# Altium footprint library PCB_V2.PcbLib: 82 footprints (part 1 of 6)
Each footprint in its own frame and in the unit in brackets; x right, y up, seen from the top. Pads: shape width x height; smd on the part's side, far side on the other; paste and mask are expansions set on the pad; w line width, h text height; cw(c..) or ccw(c..) is an arc to the next point about the centre after c.
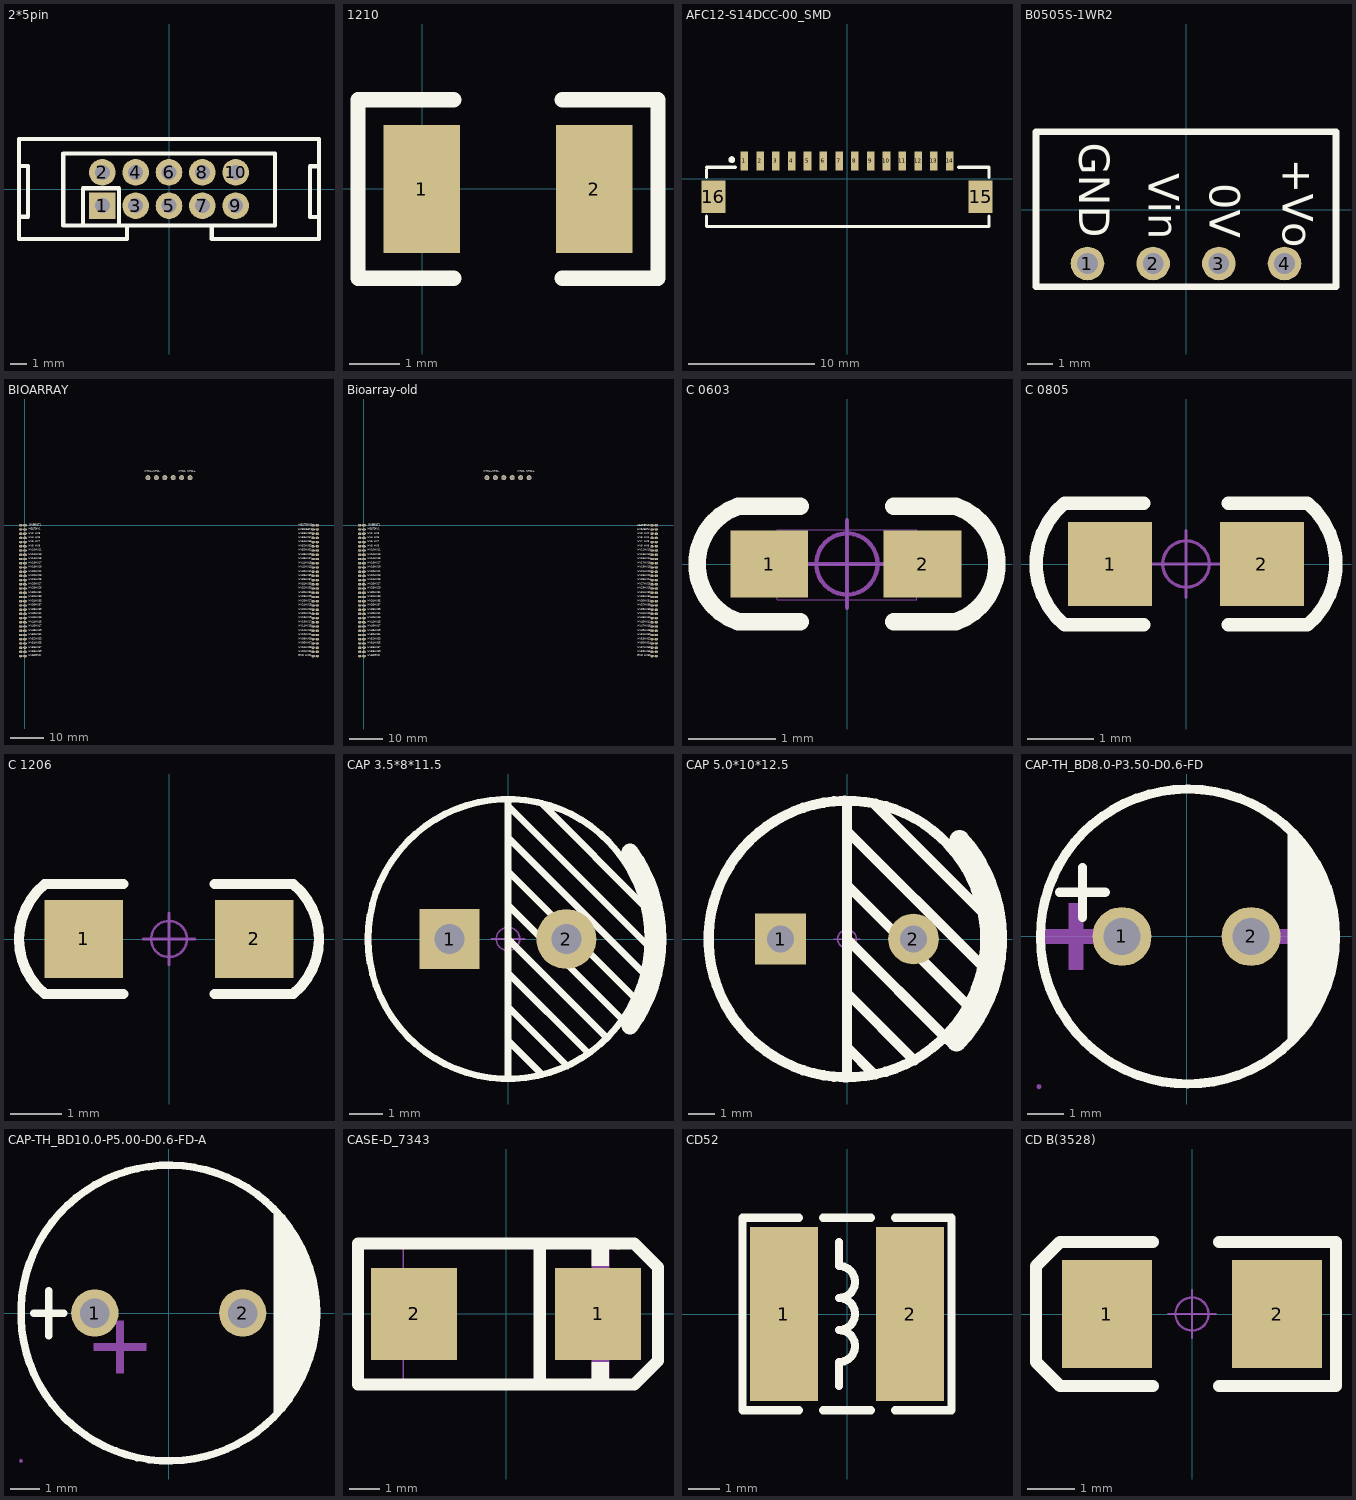
[diagram p0: the footprints below, top view; thin cyan lines are the x and y axes]

## 2*5pin [mm]
pads (10):
  rect 1.6x1.6 hole 0.9: 1(-4,-1)
  round 1.6 hole 0.9: 2(-4,1) 3(-2,-1) 4(-2,1) 5(0,-1) 6(0,1) 7(2,-1) 8(2,1) 9(4,-1) 10(4,1)
Top Overlay:
  lines w0.254: -8.994,-1.662 -8.456,-1.662 -8.456,1.386 -8.964,1.386 ; -5.156,-2.134 -5.156,0.051 -2.997,0.051 -2.997,-2.134 ; -2.512,-2.237 -2.512,-3 -9,-3 -9,3 9,3 9,-3 2.568,-3 2.568,-2.187 ; 8.966,-1.687 8.458,-1.687 8.458,1.361 8.996,1.361 ; -6.348,-2.184 6.352,-2.184 6.352,2.134 -6.348,2.134 -6.348,-2.184
Bottom Overlay:
  lines w0.254: -5.055,0 4.953,0 ; -2.977,-2.184 -2.977,2.184 ; -0.977,-2.184 -0.977,2.184 ; 1.023,-2.184 1.023,2.184 ; 3.023,-2.184 3.023,2.184

## 1210 [mil]
height 100
pads (2):
  rect 60x100 smd: 1(-0.2,-0.37) 2(134.8,-0.37)
Top Overlay:
  lines w12: 24.8,-70.37 -50.2,-70.37 -50.2,69.63 24.8,69.63 ; 109.8,-70.37 184.8,-70.37 184.8,69.63 109.8,69.63

## AFC12-S14DCC-00_SMD [mm]
pads (16):
  rect 0.6x1.5 smd: 1(-8.125,1.417) 2(-6.875,1.417) 3(-5.625,1.417) 4(-4.375,1.417) 5(-3.125,1.417) 6(-1.875,1.417) 7(-0.625,1.417) 8(0.625,1.417) 9(1.875,1.417) 10(3.125,1.417) 11(4.375,1.417) 12(5.625,1.417) 13(6.875,1.417) 14(8.125,1.417)
  rect 1.9x2.6 smd: 15(10.575,-1.418) 16(-10.575,-1.418)
Top Overlay:
  circle w0.254: c-9.125,1.518 r0.141
  lines w0.254: -11.125,-2.949 -11.125,-3.783 11.25,-3.783 11.25,-2.949 ; -11.125,0.114 -11.125,0.737 ; -11.125,0.917 -8.825,0.917 ; 8.826,0.917 11.25,0.917 11.25,0.114

## B0505S-1WR2 [mm]
pads (4):
  round 1.3 hole 0.8: 1(-3.81,-2.072) 2(-1.27,-2.072) 3(1.27,-2.072) 4(3.81,-2.072)
Top Overlay:
  lines w0.254: -5.8,-2.972 5.8,-2.972 5.8,3.028 -5.8,3.028 -5.8,-2.972
  text "+Vo" at 3.353,1.981 h2
  text "0V" at 0.533,1.041 h2
  text "Vin" at -1.829,1.422 h2
  text "GND" at -4.521,2.591 h2

## BIOARRAY [mm]
pads (134):
  oval 1.05x0.7 hole 0.6: 1(-1.27,0) 3(-1.27,-1.27) 5(-1.27,-2.54) 7(-1.27,-3.81) 9(-1.27,-5.08) 11(-1.27,-6.35) 13(-1.27,-7.62) 15(-1.27,-8.89) 17(-1.27,-10.16) 19(-1.27,-11.43) 21(-1.27,-12.7) 23(-1.27,-13.97) 25(-1.27,-15.24) 27(-1.27,-16.51) 29(-1.27,-17.78) 31(-1.27,-19.05) 33(-1.27,-20.32) 35(-1.27,-21.59) 37(-1.27,-22.86) 39(-1.27,-24.13) 41(-1.27,-25.4) 43(-1.27,-26.67) 45(-1.27,-27.94) 47(-1.27,-29.21) 49(-1.27,-30.48) 51(-1.27,-31.75) 53(-1.27,-33.02) 55(-1.27,-34.29) 57(-1.27,-35.56) 59(-1.27,-36.83) 61(-1.27,-38.1) 63(-1.27,-39.37) 65(87.93,0) 66(86.66,0) 67(87.93,-1.27) 68(86.66,-1.27) 69(87.93,-2.54) 70(86.66,-2.54) 71(87.93,-3.81) 72(86.66,-3.81) 73(87.93,-5.08) 74(86.66,-5.08) 75(87.93,-6.35) 76(86.66,-6.35) 77(87.93,-7.62) 78(86.66,-7.62) 79(87.93,-8.89) 80(86.66,-8.89) 81(87.93,-10.16) 82(86.66,-10.16) 83(87.93,-11.43) 84(86.66,-11.43) 85(87.93,-12.7) 86(86.66,-12.7) 87(87.93,-13.97) 88(86.66,-13.97) 89(87.93,-15.24) 90(86.66,-15.24) 91(87.93,-16.51) 92(86.66,-16.51) 93(87.93,-17.78) 94(86.66,-17.78) 95(87.93,-19.05) 96(86.66,-19.05) 97(87.93,-20.32) 98(86.66,-20.32) 99(87.93,-21.59) 100(86.66,-21.59) 101(87.93,-22.86) 102(86.66,-22.86) 103(87.93,-24.13) 104(86.66,-24.13) 105(87.93,-25.4) 106(86.66,-25.4) 107(87.93,-26.67) 108(86.66,-26.67) 109(87.93,-27.94) 110(86.66,-27.94) 111(87.93,-29.21) 112(86.66,-29.21) 113(87.93,-30.48) 114(86.66,-30.48) 115(87.93,-31.75) 116(86.66,-31.75) 117(87.93,-33.02) 118(86.66,-33.02) 119(87.93,-34.29) 120(86.66,-34.29) 121(87.93,-35.56) 122(86.66,-35.56) 123(87.93,-36.83) 124(86.66,-36.83) 125(87.93,-38.1) 126(86.66,-38.1) 127(87.93,-39.37) 128(86.66,-39.37)
  oval 1.1x0.7 hole 0.6: 2(0,0) 4(0,-1.27) 6(0,-2.54) 8(0,-3.81) 10(0,-5.08) 12(0,-6.35) 14(0,-7.62) 16(0,-8.89) 18(0,-10.16) 20(0,-11.43) 22(0,-12.7) 24(0,-13.97) 26(0,-15.24) 28(0,-16.51) 30(0,-17.78) 32(0,-19.05) 34(0,-20.32) 36(0,-21.59) 38(0,-22.86) 40(0,-24.13) 42(0,-25.4) 44(0,-26.67) 46(0,-27.94) 48(0,-29.21) 50(0,-30.48) 52(0,-31.75) 54(0,-33.02) 56(0,-34.29) 58(0,-35.56) 60(0,-36.83) 62(0,-38.1) 64(0,-39.37)
  round 1.5 hole 1.1: 129(36.98,14.31) 130(39.52,14.31) 131(42.06,14.31) 132(44.6,14.31) 133(47.14,14.31) 134(49.68,14.31)
Top Overlay:
  text "NTC1-" at 38.631,15.826 h0.76
  text "NTC1+" at 36.051,15.775 h0.76
  text "NTC2+" at 48.878,15.775 h0.76
  text "NTC2-" at 46.338,15.775 h0.76
  text "GND" at 82.276,-39.632 h0.76
  text "HV01" at 84.329,-39.632 h0.76
  text "HV03" at 84.329,-38.362 h0.76
  text "HV05" at 84.329,-37.092 h0.76
  text "HV07" at 84.329,-35.822 h0.76
  text "HV09" at 84.329,-34.552 h0.76
  text "HV11" at 84.329,-33.282 h0.76
  text "HV13" at 84.329,-32.012 h0.76
  text "HV15" at 84.329,-30.742 h0.76
  text "HV17" at 84.329,-29.472 h0.76
  text "HV19" at 84.329,-28.202 h0.76
  text "HV21" at 84.329,-26.932 h0.76
  text "HV23" at 84.329,-25.662 h0.76
  text "HV25" at 84.329,-24.392 h0.76
  text "HV27" at 84.329,-23.122 h0.76
  text "HV29" at 84.329,-21.852 h0.76
  text "HV31" at 84.329,-20.582 h0.76
  text "HV33" at 84.329,-19.312 h0.76
  text "HV35" at 84.329,-18.042 h0.76
  text "HV37" at 84.329,-16.772 h0.76
  text "HV39" at 84.329,-15.502 h0.76
  text "HV41" at 84.329,-14.232 h0.76
  text "HV43" at 84.329,-12.962 h0.76
  text "HV45" at 84.329,-11.692 h0.76
  text "HV47" at 84.329,-10.422 h0.76
  text "HV49" at 84.329,-9.152 h0.76
  text "HV51" at 84.329,-7.882 h0.76
  text "HV53" at 84.329,-6.612 h0.76
  text "HV02" at 82.297,-38.362 h0.76
  text "HV04" at 82.297,-37.092 h0.76
  text "HV06" at 82.297,-35.822 h0.76
  text "HV08" at 82.297,-34.552 h0.76
  text "HV10" at 82.297,-33.282 h0.76
  text "HV12" at 82.297,-32.012 h0.76
  text "HV14" at 82.297,-30.742 h0.76
  text "HV16" at 82.297,-29.472 h0.76
  text "HV18" at 82.297,-28.202 h0.76
  text "HV20" at 82.297,-26.932 h0.76
  text "HV22" at 82.297,-25.662 h0.76
  text "HV24" at 82.297,-24.392 h0.76
  text "HV26" at 82.297,-23.122 h0.76
  text "HV28" at 82.297,-21.852 h0.76
  text "HV30" at 82.297,-20.582 h0.76
  text "HV32" at 82.297,-19.312 h0.76
  text "HV34" at 82.297,-18.042 h0.76
  text "HV36" at 82.297,-16.772 h0.76
  text "HV38" at 82.297,-15.502 h0.76
  text "HV40" at 82.297,-14.232 h0.76
  text "HV42" at 82.297,-12.962 h0.76
  text "HV44" at 82.297,-11.692 h0.76
  text "HV46" at 82.297,-10.422 h0.76
  text "HV48" at 82.297,-9.152 h0.76
  text "HV50" at 82.297,-7.882 h0.76
  text "HV52" at 82.297,-6.612 h0.76
  text "HEAT4" at 83.947,-1.651 h0.76
  text "HV60" at 82.169,-1.651 h0.76
  text "HEAT3" at 82.296,-0.381 h0.76
  text "GND" at 84.582,-0.381 h0.76
  text "HV59" at 84.329,-2.802 h0.76
  text "HV58" at 82.297,-2.802 h0.76
  text "HV57" at 84.329,-4.072 h0.76
  text "HV56" at 82.297,-4.072 h0.76
  text "HV55" at 84.329,-5.342 h0.76
  text "HV54" at 82.297,-5.342 h0.76
  text "GND" at 3.028,-39.632 h0.76
  text "HV60" at 1.144,-39.632 h0.76
  text "HV58" at 1.144,-38.362 h0.76
  text "HV56" at 1.144,-37.092 h0.76
  text "HV54" at 1.144,-35.822 h0.76
  text "HV52" at 1.144,-34.552 h0.76
  text "HV50" at 1.144,-33.282 h0.76
  text "HV48" at 1.144,-32.012 h0.76
  text "HV46" at 1.144,-30.742 h0.76
  text "HV44" at 1.144,-29.472 h0.76
  text "HV42" at 1.144,-28.202 h0.76
  text "HV40" at 1.144,-26.932 h0.76
  text "HV38" at 1.144,-25.662 h0.76
  text "HV36" at 1.144,-24.392 h0.76
  text "HV34" at 1.144,-23.122 h0.76
  text "HV32" at 1.144,-21.852 h0.76
  text "HV30" at 1.144,-20.582 h0.76
  text "HV28" at 1.144,-19.312 h0.76
  text "HV26" at 1.144,-18.042 h0.76
  text "HV24" at 1.144,-16.772 h0.76
  text "HV22" at 1.144,-15.502 h0.76
  text "HV20" at 1.144,-14.232 h0.76
  text "HV18" at 1.144,-12.962 h0.76
  text "HV16" at 1.144,-11.692 h0.76
  text "HV14" at 1.144,-10.422 h0.76
  text "HV12" at 1.144,-9.152 h0.76
  text "HV10" at 1.144,-7.882 h0.76
  text "HV8" at 1.144,-6.612 h0.76
  text "HV59" at 3.049,-38.362 h0.76
  text "HV57" at 3.049,-37.092 h0.76
  text "HV55" at 3.049,-35.822 h0.76
  text "HV53" at 3.049,-34.552 h0.76
  text "HV51" at 3.049,-33.282 h0.76
  text "HV49" at 3.049,-32.012 h0.76
  text "HV47" at 3.049,-30.742 h0.76
  text "HV45" at 3.049,-29.472 h0.76
  text "HV43" at 3.049,-28.202 h0.76
  text "HV41" at 3.049,-26.932 h0.76
  text "HV39" at 3.049,-25.662 h0.76
  text "HV37" at 3.049,-24.392 h0.76
  text "HV35" at 3.049,-23.122 h0.76
  text "HV33" at 3.049,-21.852 h0.76
  text "HV31" at 3.049,-20.582 h0.76
  text "HV29" at 3.049,-19.312 h0.76
  text "HV27" at 3.049,-18.042 h0.76
  text "HV25" at 3.049,-16.772 h0.76
  text "HV23" at 3.049,-15.502 h0.76
  text "HV21" at 3.049,-14.232 h0.76
  text "HV19" at 3.049,-12.962 h0.76
  text "HV17" at 3.049,-11.692 h0.76
  text "HV15" at 3.049,-10.422 h0.76
  text "HV13" at 3.049,-9.152 h0.76
  text "HV11" at 3.049,-7.882 h0.76
  text "HV9" at 3.049,-6.612 h0.76
  text "HV1" at 3.303,-1.533 h0.76
  text "HEAT2" at 1.144,-1.539 h0.76
  text "GND" at 1.25,-0.262 h0.76
  text "HEAT1" at 2.541,-0.269 h0.76
  text "HV2" at 1.144,-2.802 h0.76
  text "HV3" at 3.049,-2.802 h0.76
  text "HV4" at 1.144,-4.072 h0.76
  text "HV5" at 3.049,-4.072 h0.76
  text "HV6" at 1.144,-5.342 h0.76
  text "HV7" at 3.049,-5.342 h0.76

## Bioarray-old [mm]
pads (134):
  oval 1.05x0.7 hole 0.6: 1(-1.27,0) 3(-1.27,-1.27) 5(-1.27,-2.54) 7(-1.27,-3.81) 9(-1.27,-5.08) 11(-1.27,-6.35) 13(-1.27,-7.62) 15(-1.27,-8.89) 17(-1.27,-10.16) 19(-1.27,-11.43) 21(-1.27,-12.7) 23(-1.27,-13.97) 25(-1.27,-15.24) 27(-1.27,-16.51) 29(-1.27,-17.78) 31(-1.27,-19.05) 33(-1.27,-20.32) 35(-1.27,-21.59) 37(-1.27,-22.86) 39(-1.27,-24.13) 41(-1.27,-25.4) 43(-1.27,-26.67) 45(-1.27,-27.94) 47(-1.27,-29.21) 49(-1.27,-30.48) 51(-1.27,-31.75) 53(-1.27,-33.02) 55(-1.27,-34.29) 57(-1.27,-35.56) 59(-1.27,-36.83) 61(-1.27,-38.1) 63(-1.27,-39.37) 65(87.93,0) 66(86.66,0) 67(87.93,-1.27) 68(86.66,-1.27) 69(87.93,-2.54) 70(86.66,-2.54) 71(87.93,-3.81) 72(86.66,-3.81) 73(87.93,-5.08) 74(86.66,-5.08) 75(87.93,-6.35) 76(86.66,-6.35) 77(87.93,-7.62) 78(86.66,-7.62) 79(87.93,-8.89) 80(86.66,-8.89) 81(87.93,-10.16) 82(86.66,-10.16) 83(87.93,-11.43) 84(86.66,-11.43) 85(87.93,-12.7) 86(86.66,-12.7) 87(87.93,-13.97) 88(86.66,-13.97) 89(87.93,-15.24) 90(86.66,-15.24) 91(87.93,-16.51) 92(86.66,-16.51) 93(87.93,-17.78) 94(86.66,-17.78) 95(87.93,-19.05) 96(86.66,-19.05) 97(87.93,-20.32) 98(86.66,-20.32) 99(87.93,-21.59) 100(86.66,-21.59) 101(87.93,-22.86) 102(86.66,-22.86) 103(87.93,-24.13) 104(86.66,-24.13) 105(87.93,-25.4) 106(86.66,-25.4) 107(87.93,-26.67) 108(86.66,-26.67) 109(87.93,-27.94) 110(86.66,-27.94) 111(87.93,-29.21) 112(86.66,-29.21) 113(87.93,-30.48) 114(86.66,-30.48) 115(87.93,-31.75) 116(86.66,-31.75) 117(87.93,-33.02) 118(86.66,-33.02) 119(87.93,-34.29) 120(86.66,-34.29) 121(87.93,-35.56) 122(86.66,-35.56) 123(87.93,-36.83) 124(86.66,-36.83) 125(87.93,-38.1) 126(86.66,-38.1) 127(87.93,-39.37) 128(86.66,-39.37)
  oval 1.1x0.7 hole 0.6: 2(0,0) 4(0,-1.27) 6(0,-2.54) 8(0,-3.81) 10(0,-5.08) 12(0,-6.35) 14(0,-7.62) 16(0,-8.89) 18(0,-10.16) 20(0,-11.43) 22(0,-12.7) 24(0,-13.97) 26(0,-15.24) 28(0,-16.51) 30(0,-17.78) 32(0,-19.05) 34(0,-20.32) 36(0,-21.59) 38(0,-22.86) 40(0,-24.13) 42(0,-25.4) 44(0,-26.67) 46(0,-27.94) 48(0,-29.21) 50(0,-30.48) 52(0,-31.75) 54(0,-33.02) 56(0,-34.29) 58(0,-35.56) 60(0,-36.83) 62(0,-38.1) 64(0,-39.37)
  round 1.5 hole 1.1: 129(36.98,14.31) 130(39.52,14.31) 131(42.06,14.31) 132(44.6,14.31) 133(47.14,14.31) 134(49.68,14.31)
Top Overlay:
  text "HV7" at 3.049,-5.342 h0.76
  text "HV6" at 1.144,-5.342 h0.76
  text "HV5" at 3.049,-4.072 h0.76
  text "HV4" at 1.144,-4.072 h0.76
  text "HV3" at 3.049,-2.802 h0.76
  text "HV2" at 1.144,-2.802 h0.76
  text "HEAT1" at 2.541,-0.269 h0.76
  text "GND" at 1.25,-0.262 h0.76
  text "HEAT2" at 1.144,-1.539 h0.76
  text "HV1" at 3.303,-1.533 h0.76
  text "HV9" at 3.049,-6.612 h0.76
  text "HV11" at 3.049,-7.882 h0.76
  text "HV13" at 3.049,-9.152 h0.76
  text "HV15" at 3.049,-10.422 h0.76
  text "HV17" at 3.049,-11.692 h0.76
  text "HV19" at 3.049,-12.962 h0.76
  text "HV21" at 3.049,-14.232 h0.76
  text "HV23" at 3.049,-15.502 h0.76
  text "HV25" at 3.049,-16.772 h0.76
  text "HV27" at 3.049,-18.042 h0.76
  text "HV29" at 3.049,-19.312 h0.76
  text "HV31" at 3.049,-20.582 h0.76
  text "HV33" at 3.049,-21.852 h0.76
  text "HV35" at 3.049,-23.122 h0.76
  text "HV37" at 3.049,-24.392 h0.76
  text "HV39" at 3.049,-25.662 h0.76
  text "HV41" at 3.049,-26.932 h0.76
  text "HV43" at 3.049,-28.202 h0.76
  text "HV45" at 3.049,-29.472 h0.76
  text "HV47" at 3.049,-30.742 h0.76
  text "HV49" at 3.049,-32.012 h0.76
  text "HV51" at 3.049,-33.282 h0.76
  text "HV53" at 3.049,-34.552 h0.76
  text "HV55" at 3.049,-35.822 h0.76
  text "HV57" at 3.049,-37.092 h0.76
  text "HV59" at 3.049,-38.362 h0.76
  text "HV8" at 1.144,-6.612 h0.76
  text "HV10" at 1.144,-7.882 h0.76
  text "HV12" at 1.144,-9.152 h0.76
  text "HV14" at 1.144,-10.422 h0.76
  text "HV16" at 1.144,-11.692 h0.76
  text "HV18" at 1.144,-12.962 h0.76
  text "HV20" at 1.144,-14.232 h0.76
  text "HV22" at 1.144,-15.502 h0.76
  text "HV24" at 1.144,-16.772 h0.76
  text "HV26" at 1.144,-18.042 h0.76
  text "HV28" at 1.144,-19.312 h0.76
  text "HV30" at 1.144,-20.582 h0.76
  text "HV32" at 1.144,-21.852 h0.76
  text "HV34" at 1.144,-23.122 h0.76
  text "HV36" at 1.144,-24.392 h0.76
  text "HV38" at 1.144,-25.662 h0.76
  text "HV40" at 1.144,-26.932 h0.76
  text "HV42" at 1.144,-28.202 h0.76
  text "HV44" at 1.144,-29.472 h0.76
  text "HV46" at 1.144,-30.742 h0.76
  text "HV48" at 1.144,-32.012 h0.76
  text "HV50" at 1.144,-33.282 h0.76
  text "HV52" at 1.144,-34.552 h0.76
  text "HV54" at 1.144,-35.822 h0.76
  text "HV56" at 1.144,-37.092 h0.76
  text "HV58" at 1.144,-38.362 h0.76
  text "HV60" at 1.144,-39.632 h0.76
  text "GND" at 3.028,-39.632 h0.76
  text "HV7" at 82.297,-5.342 h0.76
  text "HV6" at 84.329,-5.342 h0.76
  text "HV5" at 82.297,-4.072 h0.76
  text "HV4" at 84.329,-4.072 h0.76
  text "HV3" at 82.297,-2.802 h0.76
  text "HV2" at 84.329,-2.802 h0.76
  text "GND" at 84.308,-0.389 h0.76
  text "HEAT3" at 82.17,-0.391 h0.76
  text "HV1" at 82.17,-1.659 h0.76
  text "HEAT4" at 83.567,-1.666 h0.76
  text "HV9" at 82.297,-6.612 h0.76
  text "HV11" at 82.297,-7.882 h0.76
  text "HV13" at 82.297,-9.152 h0.76
  text "HV15" at 82.297,-10.422 h0.76
  text "HV17" at 82.297,-11.692 h0.76
  text "HV19" at 82.297,-12.962 h0.76
  text "HV21" at 82.297,-14.232 h0.76
  text "HV23" at 82.297,-15.502 h0.76
  text "HV25" at 82.297,-16.772 h0.76
  text "HV27" at 82.297,-18.042 h0.76
  text "HV29" at 82.297,-19.312 h0.76
  text "HV31" at 82.297,-20.582 h0.76
  text "HV33" at 82.297,-21.852 h0.76
  text "HV35" at 82.297,-23.122 h0.76
  text "HV37" at 82.297,-24.392 h0.76
  text "HV39" at 82.297,-25.662 h0.76
  text "HV41" at 82.297,-26.932 h0.76
  text "HV43" at 82.297,-28.202 h0.76
  text "HV45" at 82.297,-29.472 h0.76
  text "HV47" at 82.297,-30.742 h0.76
  text "HV49" at 82.297,-32.012 h0.76
  text "HV51" at 82.297,-33.282 h0.76
  text "HV53" at 82.297,-34.552 h0.76
  text "HV55" at 82.297,-35.822 h0.76
  text "HV57" at 82.297,-37.092 h0.76
  text "HV59" at 82.297,-38.362 h0.76
  text "HV8" at 84.329,-6.612 h0.76
  text "HV10" at 84.329,-7.882 h0.76
  text "HV12" at 84.329,-9.152 h0.76
  text "HV14" at 84.329,-10.422 h0.76
  text "HV16" at 84.329,-11.692 h0.76
  text "HV18" at 84.329,-12.962 h0.76
  text "HV20" at 84.329,-14.232 h0.76
  text "HV22" at 84.329,-15.502 h0.76
  text "HV24" at 84.329,-16.772 h0.76
  text "HV26" at 84.329,-18.042 h0.76
  text "HV28" at 84.329,-19.312 h0.76
  text "HV30" at 84.329,-20.582 h0.76
  text "HV32" at 84.329,-21.852 h0.76
  text "HV34" at 84.329,-23.122 h0.76
  text "HV36" at 84.329,-24.392 h0.76
  text "HV38" at 84.329,-25.662 h0.76
  text "HV40" at 84.329,-26.932 h0.76
  text "HV42" at 84.329,-28.202 h0.76
  text "HV44" at 84.329,-29.472 h0.76
  text "HV46" at 84.329,-30.742 h0.76
  text "HV48" at 84.329,-32.012 h0.76
  text "HV50" at 84.329,-33.282 h0.76
  text "HV52" at 84.329,-34.552 h0.76
  text "HV54" at 84.329,-35.822 h0.76
  text "HV56" at 84.329,-37.092 h0.76
  text "HV58" at 84.329,-38.362 h0.76
  text "HV60" at 84.329,-39.632 h0.76
  text "GND" at 82.276,-39.632 h0.76
  text "NTC2-" at 46.338,15.775 h0.76
  text "NTC2+" at 48.878,15.775 h0.76
  text "NTC1+" at 36.051,15.775 h0.76
  text "NTC1-" at 38.631,15.826 h0.76

## C 0603 [mil]
pads (2):
  rect 35x30 smd: 1(-35,0) 2(34,0)
Top Overlay:
  lines w7.87: -21,-26 -49.02,-26 cw(c-40,0) -49.02,26 -21,26 ; 21,-26 49.02,-26 ccw(c40,0) 49.02,26 21,26
Mechanical 13:
  lines w0.39: -31.5,-16 31.5,-16 31.5,15.5 -31.5,15.5 -31.5,-16
Mechanical 15:
  circle w1.97: c0,0 r13.78
  lines w1.97: -19.68,0 19.68,0 ; 0,-19.68 0,19.68
3D body: height 31.89, standoff -0.39, extent -31.5,-16.14 31.5,16.14

## C 0805 [mil]
height 19.68
pads (2):
  rect 50x50 smd: 1(-45,0) 2(45,0)
Top Overlay:
  lines w7.87: -25,-36 -72,-36 cw(c-42,0) -72,36 -25,36 ; 25,-36 72,-36 ccw(c42,0) 72,36 25,36
Mechanical 15:
  circle w1.97: c0,0 r13.78
  lines w1.97: -19.68,0 19.68,0 ; 0,-19.68 0,19.68
3D body: height 20.08, standoff -0.39, extent -39.37,-24.02 39.37,24.02

## C 1206 [mil]
pads (2):
  rect 60x60 smd: 1(-65,0) 2(65,0)
Top Overlay:
  lines w7.87: -35,-42 -95,-42 cw(c-60,0) -95,42 -35,42 ; 35,-42 95,-42 ccw(c60,0) 95,42 35,42
Mechanical 15:
  circle w1.97: c0,0 r13.78
  lines w1.97: -19.68,0 19.68,0 ; 0,-19.68 0,19.68
3D body: height 47.64, standoff -0.39, extent -62.99,-31.89 62.99,31.89

## CAP 3.5*8*11.5 [mm] "脚距3.5"
pads (2):
  rect 1.8x1.8 hole 0.9: 1(-1.75,0)
  round 1.8 hole 0.9: 2(1.75,0)
Top Overlay:
  circle w0.2: c0,0 r4.2
  lines w0.2: 0,-4.191 0,4 ; 0,-3.048 1.016,-4.064 ; 0,-2.032 1.778,-3.81 ; 0,-1.016 2.413,-3.429 ; 0,0 2.921,-2.921 ; 0,1.016 3.429,-2.413 ; 0,2.032 3.81,-1.778 ; 0,3.048 4.064,-1.016 ; 0,4.191 0,4 ; 1.016,4.064 4.191,0.889 ; 4.191,-0.127 4.127,-0.127 0,4
  lines w0.504: 3.663,-2.616 ccw(c0,0) 3.663,2.616
Mechanical 15:
  circle w0.05: c0,0 r0.35
  lines w0.05: -0.5,0 0.5,0 ; 0,-0.5 0,0.5
3D body: height 11.53, standoff -3.38, extent -4,-4 4.01,4

## CAP 5.0*10*12.5 [mm] "脚距5m"
pads (2):
  rect 1.9x1.9 hole 1: 1(-2.5,0)
  round 1.9 hole 1: 2(2.5,0)
Top Overlay:
  circle w0.381: c0,0 r5.2
  lines w0.381: 0,-5.207 0,5.08 ; 0,-4.064 1.016,-5.08 ; 0,-2.032 2.54,-4.572 ; 0,-1.016 0,-0.508 ; 0,0 3.81,-3.81 ; 0,2.032 4.572,-2.54 ; 0,4.064 5.08,-1.016 ; 1.016,5.08 5.588,0.508
  lines w0.75: 4.114,-3.857 ccw(c0,0) 4.229,3.731
Mechanical 15:
  circle w0.05: c0,0 r0.35
  lines w0.05: -0.5,0 0.5,0 ; 0,-0.5 0,0.5
3D body: height 12.55, standoff -3.36, extent -5.003,-5.006 5.007,4.993

## CAP-TH_BD8.0-P3.50-D0.6-FD [mm]
pads (2):
  round 1.6 hole 1: 1(-1.75,0) 2(1.75,0)
Top Overlay:
  region: 2.753,-3.003 3.059,-2.654 3.375,-2.18 3.628,-1.668 3.811,-1.128 3.922,-0.569 3.959,0 3.922,0.569 3.811,1.128 3.628,1.668 3.375,2.18 3.059,2.654 2.753,3.003 2.75,3
  lines w0.254: -3.445,1.2 -2.2,1.2 ; -2.822,0.527 -2.822,1.873 ; 0.003,4 ccw(c0.038,0.001) 0.074,4
Mechanical 6:
  region: 2.1,0.2 2.1,-0.2 3.9,-0.2 3.9,0.2
  region: -3.9,0.2 -3.9,-0.2 -2.1,-0.2 -2.1,0.2
  region: -3.2,-0.9 -2.8,-0.9 -2.8,0.9 -3.2,0.9
Mechanical 15:
  region: -3.936,-4.072 -3.955,-4.026 -4.001,-4.007 -4.047,-4.026 -4.066,-4.072 -4.047,-4.118 -4.001,-4.137 -3.955,-4.118 -3.936,-4.072
  region: 2.055,0 2.033,0.111 1.966,0.21 1.867,0.277 1.75,0.3 1.633,0.277 1.534,0.21 1.467,0.111 1.445,0 1.467,-0.111 1.534,-0.211 1.633,-0.277 1.75,-0.3 1.867,-0.277 1.966,-0.211 2.033,-0.111
  region: -1.445,0 -1.467,0.111 -1.534,0.21 -1.633,0.277 -1.75,0.3 -1.867,0.277 -1.966,0.21 -2.033,0.111 -2.055,0 -2.033,-0.111 -1.966,-0.211 -1.867,-0.277 -1.75,-0.3 -1.633,-0.277 -1.534,-0.211 -1.467,-0.111
  lines w0.051: -0.003,-4.072 cw(c-0.001,-0.072) -0.001,3.928 cw(c-0.001,-0.072) 0,-4.072 -0.003,-4.072

## CAP-TH_BD10.0-P5.00-D0.6-FD-A [mm]
pads (2):
  round 1.6 hole 1: 1(-2.5,0) 2(2.5,0)
Top Overlay:
  circle w0.254: c0,0 r5
  region: 3.556,3.556 3.556,-3.556 4.318,-2.54 4.826,-1.016 5.08,0.508 4.826,1.524
  lines w0.254: -4.572,0 -3.556,0 ; -4.064,-0.762 -4.064,0.762
Mechanical 6:
  region: -2.54,-1.016 -0.762,-1.016 -0.762,-1.27 -2.54,-1.27
  region: -1.778,-2.032 -1.524,-2.032 -1.524,-0.254 -1.778,-0.254
Mechanical 15:
  region: -4.935,-5 -4.954,-4.954 -5,-4.935 -5.046,-4.954 -5.065,-5 -5.046,-5.046 -5,-5.065 -4.954,-5.046 -4.935,-5
  region: -2.195,0 -2.217,0.111 -2.284,0.21 -2.383,0.277 -2.5,0.3 -2.617,0.277 -2.716,0.21 -2.783,0.111 -2.805,0 -2.783,-0.111 -2.716,-0.211 -2.617,-0.277 -2.5,-0.3 -2.383,-0.277 -2.284,-0.211 -2.217,-0.111
  region: 2.805,0 2.783,0.111 2.716,0.21 2.617,0.277 2.5,0.3 2.383,0.277 2.284,0.21 2.217,0.111 2.195,0 2.217,-0.111 2.284,-0.211 2.383,-0.277 2.5,-0.3 2.617,-0.277 2.716,-0.211 2.783,-0.111
  lines w0.051: -5,0 cw(c0,0) 5,0 cw(c0,0) -5,0

## CASE-D_7343 [mm]
pads (2):
  rect 2.799x3.01 smd: 1(3,0) 2(-3,0)
Top Overlay:
  region: 3.348,-2.3 3.348,-1.565 2.798,-1.565 2.798,-2.285 2.813,-2.3
  region: 2.798,2.3 2.798,1.565 3.348,1.565 3.348,2.285 3.333,2.3
  lines w0.4: 1.1,-2.3 1.101,2.3 ; -4.827,-2.3 3.7,-2.3 4.177,-2.3 4.953,-1.524 4.953,1.524 4.177,2.3 3.6,2.3 -4.825,2.3 -4.827,-2.3
Mechanical 6:
  region: 3.35,-2.15 3.35,-1.205 2.8,-1.205 2.8,-2.15
  region: 2.8,2.15 2.8,1.205 3.35,1.205 3.35,2.15
  region: 2.8,0.85 2.8,-0.85 2.4,-0.85 2.4,0.85
  region: 1.766,0.245 3.466,0.245 3.466,-0.155 1.766,-0.155
  region: -3.6,0.2 -1.9,0.2 -1.9,-0.2 -3.6,-0.2
Mechanical 15:
  region: 3.65,-1.2 2.35,-1.2 2.35,1.2 3.65,1.2
  region: -2.35,-1.2 -3.65,-1.2 -3.65,1.2 -2.35,1.2
  region: 3.714,2.15 3.696,2.195 3.65,2.214 3.604,2.195 3.586,2.15 3.604,2.105 3.65,2.086 3.696,2.105
  lines w0.051: -3.35,-2.15 3.35,-2.15 3.35,2.15 -3.35,2.15 -3.35,-2.15

## CD52 [mm] "5.8"
pads (2):
  rect 2.15x5.5 smd: 1(-2,0) 2(2,0)
Top Overlay:
  lines w0.254: -1.524,-3.048 -3.302,-3.048 -3.302,3.048 -1.524,3.048 ; -0.762,-3.048 0.762,-3.048 ; -0.762,3.048 0.762,3.048 ; -0.254,-2.286 -0.254,-1.524 ccw(c-0.254,-1.016) -0.254,-0.508 ccw(c-0.254,0) -0.254,0.508 ccw(c-0.254,1.016) -0.254,1.524 -0.254,2.286 ; 1.524,-3.048 3.302,-3.048 3.302,3.048 1.524,3.048
3D body: height 3.2, standoff 0, extent -2.874,-2.5 2.874,2.5

## CD B(3528) [mil] "长3.5mm?"
pads (2):
  rect 75x90 smd: 1(-70.87,-0.01) 2(70.86,-0.01)
Top Overlay:
  lines w10: -32.51,-60 -110,-60 -130,-40 -130,40 -110,60 -32.51,60 ; 22.49,-60 120,-60 120,60 22.49,60
Mechanical 15:
  circle w1.97: c0,0 r13.78
  lines w1.97: -19.68,0 19.68,0 ; 0,-19.68 0,19.68
3D body: height 74.84, standoff -0.3, extent -68.92,-55.12 68.91,55.11